# Altium integrated library CD74HCT238E.IntLib: 1 symbol
Pins are listed as number, name and electrical type; pins without a type are passive.

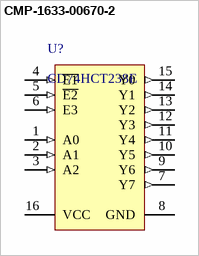
[diagram p0: symbol CMP-1633-00670-2]

## CMP-1633-00670-2
designator U?, comment CD74HCT238E
High Speed CMOS Logic 3-to-8 Line Decoder Demultiplexer Inverting and Non-Inverting, N0016A, TUBE; Manufacturer: Texas Instruments; ICC @ Nom Voltage(Max)(mA): 0.08; Configuration: 3：8; Output Drive (IOL/IOH)(Max)(mA): 4/-4; Channels(#): 1; VCC(Min)(V): 4.5; Function: Decoder/Demultiplexer; Schmitt Trigger: No; F @ Nom Voltage(Max)(Mhz): 25; Bits(#): 8; Rating: Catalog; Voltage(Nom)(V): 5; Technology Family: HCT; Input Type: TTL; VCC(Max)(V): 5.5; tpd @ Nom Voltage(Max)(ns): 35; Generic Part Number: CD74HCT238; Code_JEDEC: MS-001; PackageReference: N0016A; Output Type: CMOS; Operating Temperature Range(C): -55 to 125; Type: Standard; DatasheetVersion: SCHS147I
footprint N0016A (DIP, 16-Leads, Body 19.7x6.6mm, Pitch 2.54mm)
pins: 1 A0 (in), 2 A1 (in), 3 A2 (in), 4 ~{E1} (in), 5 ~{E2} (in), 6 E3 (in), 7 Y7 (out), 8 GND (power), 9 Y6 (out), 10 Y5 (out), 11 Y4 (out), 12 Y3 (out), 13 Y2 (out), 14 Y1 (out), 15 Y0 (out), 16 VCC (power)